# Altium schematic symbol library USB5734-IMR.SchLib: 1 symbol
Pins are listed as number, name and electrical type; pins without a type are passive.

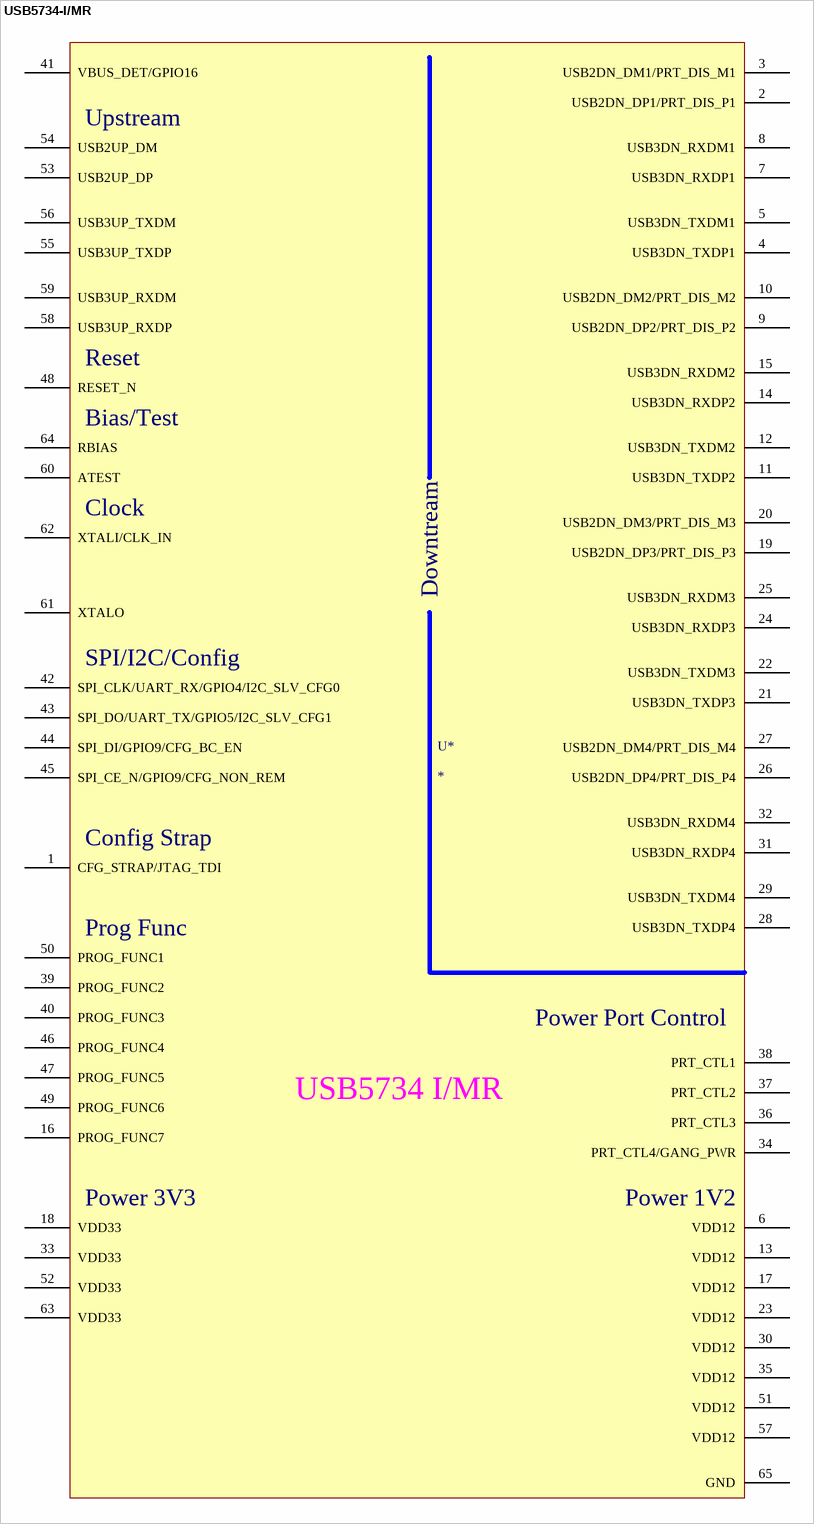
[diagram p0: symbol USB5734-I/MR]

## USB5734-I/MR
designator U*
USB5734-I/MR / USB Hub Controller USB 3.0 I2C, SPI, UART Interface 64-VQFN (9x9)
footprint USB5734-I/MR
pins: 1 CFG_STRAP/JTAG_TDI, 2 USB2DN_DP1/PRT_DIS_P1, 3 USB2DN_DM1/PRT_DIS_M1, 4 USB3DN_TXDP1, 5 USB3DN_TXDM1, 6 VDD12, 7 USB3DN_RXDP1, 8 USB3DN_RXDM1, 9 USB2DN_DP2/PRT_DIS_P2, 10 USB2DN_DM2/PRT_DIS_M2, 11 USB3DN_TXDP2, 12 USB3DN_TXDM2, 13 VDD12, 14 USB3DN_RXDP2, 15 USB3DN_RXDM2, 16 PROG_FUNC7, 17 VDD12, 18 VDD33, 19 USB2DN_DP3/PRT_DIS_P3, 20 USB2DN_DM3/PRT_DIS_M3, 21 USB3DN_TXDP3, 22 USB3DN_TXDM3, 23 VDD12, 24 USB3DN_RXDP3, 25 USB3DN_RXDM3, 26 USB2DN_DP4/PRT_DIS_P4, 27 USB2DN_DM4/PRT_DIS_M4, 28 USB3DN_TXDP4, 29 USB3DN_TXDM4, 30 VDD12, 31 USB3DN_RXDP4, 32 USB3DN_RXDM4, 33 VDD33, 34 PRT_CTL4/GANG_PWR, 35 VDD12, 36 PRT_CTL3, 37 PRT_CTL2, 38 PRT_CTL1, 39 PROG_FUNC2, 40 PROG_FUNC3, 41 VBUS_DET/GPIO16, 42 SPI_CLK/UART_RX/GPIO4/I2C_SLV_CFG0, 43 SPI_DO/UART_TX/GPIO5/I2C_SLV_CFG1, 44 SPI_DI/GPIO9/CFG_BC_EN, 45 SPI_CE_N/GPIO9/CFG_NON_REM, 46 PROG_FUNC4, 47 PROG_FUNC5, 48 RESET_N, 49 PROG_FUNC6, 50 PROG_FUNC1, 51 VDD12, 52 VDD33, 53 USB2UP_DP, 54 USB2UP_DM, 55 USB3UP_TXDP, 56 USB3UP_TXDM, 57 VDD12, 58 USB3UP_RXDP, 59 USB3UP_RXDM, 60 ATEST, 61 XTALO, 62 XTALI/CLK_IN, 63 VDD33, 64 RBIAS, 65 GND
text: Upstream; Reset; Bias/Test; Clock; Downtream; SPI/I2C/Config; Config Strap; Prog Func; Power Port Control; USB5734 I/MR; Power 3V3; Power 1V2